# Altium footprint library DM3D-SF.PcbLib: 1 footprints
Each footprint in its own frame and in the unit in brackets; x right, y up, seen from the top. Pads: shape width x height; smd on the part's side, far side on the other; paste and mask are expansions set on the pad; w line width, h text height; cw(c..) or ccw(c..) is an arc to the next point about the centre after c.
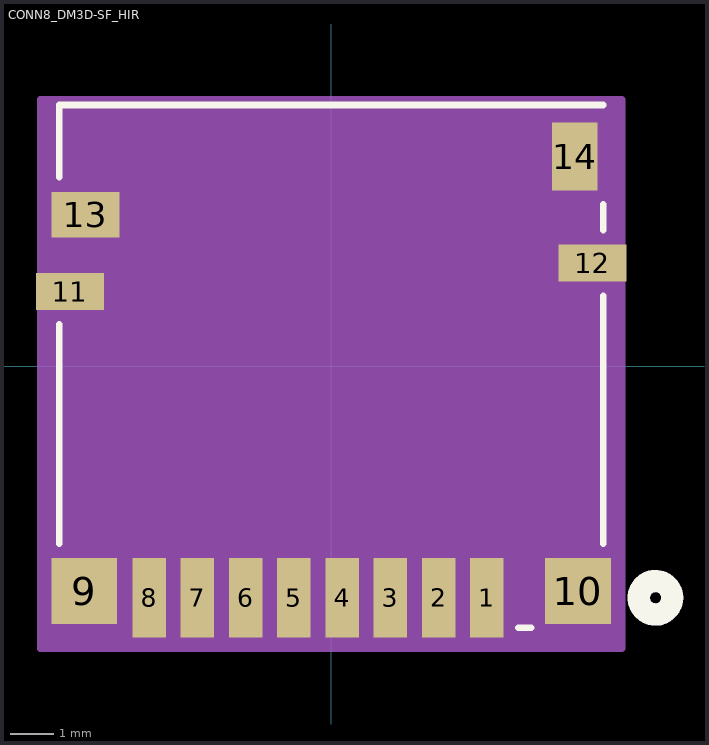
[diagram p0: the footprint, top view; thin cyan lines are the x and y axes]

## CONN8_DM3D-SF_HIR [mil]
pads (14):
  rect 30x71 smd paste+0 mask+0: 1(139.79,-207.51) 2(96.48,-207.51) 3(53.18,-207.51) 4(9.87,-207.51) 5(-33.44,-207.51) 6(-76.74,-207.51) 7(-120.05,-207.51) 8(-163.36,-207.51)
  rect 59x59 smd paste+0 mask+0: 9(-221.46,-201.51) 10(221.46,-201.51)
  rect 61x33 smd paste+0 mask+0: 11(-234.46,67.18) 12(234.46,92.77)
  rect 61x41 smd paste+0 mask+0: 13(-220.46,136.23)
  rect 41x61 smd paste+0 mask+0: 14(218.67,188.24)
Top Overlay:
  circle w20: c290.96,-207.51 r15
  lines w6: -244,-158.91 -244,37.58 ; -244,169.83 -244,234.5 244,234.5 ; 167.89,-234.5 179.33,-234.5 ; 244,-158.91 244,63.17 ; 244,122.37 244,145.56
  text ".Designator" at -137.5,-232.51 h50
Bottom Overlay:
  circle w20: c290.96,-207.51 r15
Mechanical 13:
  circle w20: c139.79,-207.51 r15
  lines w1: -239,-229.5 239,-229.5 239,229.5 -239,229.5 -239,-229.5
  text ".Designator" at -137.5,-232.51 h50
Mechanical 15:
  region: 260.96,239.5 -260.96,239.5 -260.96,-253.01 260.96,-253.01
  lines w6: -260.96,-253.01 -260.96,239.5 260.96,239.5 260.96,-253.01 -260.96,-253.01